# Altium integrated library B57236S0509M000.IntLib: 1 symbol
Pins are listed as number, name and electrical type; pins without a type are passive.

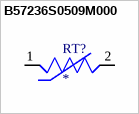
[diagram p0: symbol B57236S0509M000]

## B57236S0509M000
designator RT?
ICL 5 OHM 20% 4.5A 11.5MM; MF: EPCOS - TDK Electronics; MP: B57236S0509M000; SnapEDA_Link: https://www.snapeda.com/parts/B57236S0509M000/TDK/view-part/?ref=snap; Package: None; Value: *; Check_prices: https://www.snapeda.com/parts/B57236S0509M000/TDK/view-part/?ref=eda
footprint THRMRB500W60L1150T500H1600
pins: 1, 2